# Altium footprint library KM_ALTIUM.PcbLib: 265 footprints (part 15 of 17)
Each footprint in its own frame and in the unit in brackets; x right, y up, seen from the top. Pads: shape width x height; smd on the part's side, far side on the other; paste and mask are expansions set on the pad; w line width, h text height; cw(c..) or ccw(c..) is an arc to the next point about the centre after c.
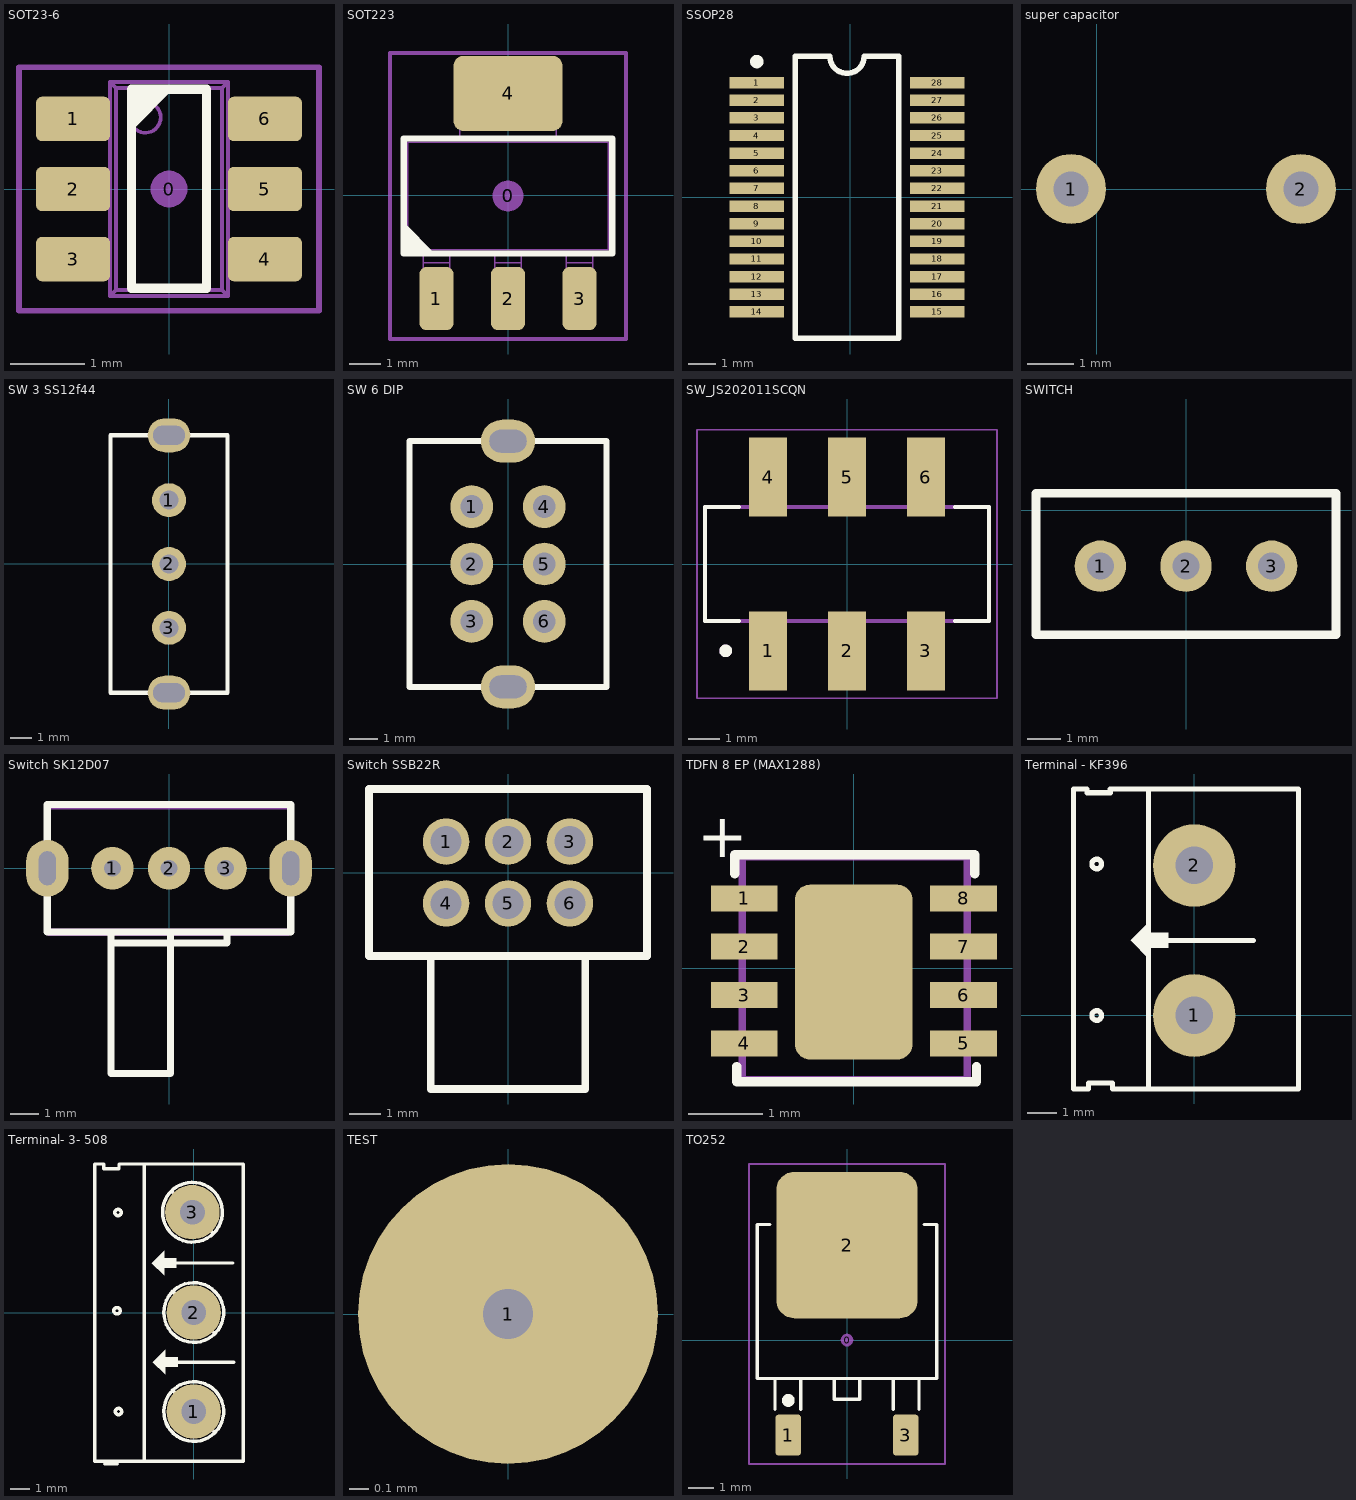
[diagram p14: the footprints below, top view; thin cyan lines are the x and y axes]

## SOT23-6 [mm]
pads (7):
  round 0.5 on Mech15: 0(0,0)
  rrect25% 1x0.6 smd: 1(-1.3,0.95) 2(-1.3,0) 3(-1.3,-0.95) 4(1.3,-0.95) 5(1.3,0) 6(1.3,0.95)
Top Overlay:
  region: -0.508,1.353 0.053,1.353 -0.508,0.792
  lines w0.127: -0.508,-1.347 0.508,-1.347 0.508,1.353 -0.508,1.353 -0.508,-1.347
  text "." at -2.275,0.95 h0.1
Mechanical 13:
  circle w0.05: c-0.32,0.97 r0.208
  lines w0.05: -1.191,-1.15 -1.191,-0.75 ; -1.191,-0.2 -1.191,0.2 ; -1.191,0.75 -1.191,1.15 ; -1.1,-1.15 -1.1,-0.75 ; -1.1,-0.2 -1.1,0.2 ; -1.1,0.75 -1.1,1.15 ; -1.094,-1.15 -1.094,-0.75 ; -1.094,-0.2 -1.094,0.2 ; -1.094,0.75 -1.094,1.15 ; -0.844,-1.15 -0.844,-0.75 ; -0.844,-0.2 -0.844,0.2 ; -0.844,0.75 -0.844,1.15 ; -0.8,-1.15 -1.4,-1.15 -1.4,-0.75 -0.8,-0.75 ; -0.8,-0.2 -1.4,-0.2 -1.4,0.2 -0.8,0.2 ; -0.8,0.75 -1.4,0.75 -1.4,1.15 -0.8,1.15 ; 0.8,-1.15 1.4,-1.15 1.4,-0.75 0.8,-0.75 ; 0.8,-0.2 1.4,-0.2 1.4,0.2 0.8,0.2 ; 0.8,0.75 1.4,0.75 1.4,1.15 0.8,1.15 ; 0.844,-1.15 0.844,-0.75 ; 0.844,-0.2 0.844,0.2 ; 0.844,0.75 0.844,1.15 ; 1.094,-1.15 1.094,-0.75 ; 1.094,-0.2 1.094,0.2 ; 1.094,0.75 1.094,1.15 ; 1.1,-1.15 1.1,-0.75 ; 1.1,-0.2 1.1,0.2 ; 1.1,0.75 1.1,1.15 ; 1.191,-1.15 1.191,-0.75 ; 1.191,-0.2 1.191,0.2 ; 1.191,0.75 1.191,1.15 ; -0.8,-1.45 -0.8,1.45 ; -0.8,-1.45 -0.719,-1.369 ; -0.8,-1.45 0.8,-1.45 ; -0.8,1.45 -0.719,1.369 ; -0.8,1.45 0.8,1.45 ; -0.719,-1.369 0.719,-1.369 ; -0.719,-1.369 -0.719,1.369 ; -0.719,1.369 0.719,1.369 ; 0.719,-1.369 0.8,-1.45 ; 0.719,-1.369 0.719,1.369 ; 0.719,1.369 0.8,1.45 ; 0.8,-1.45 0.8,1.45
Mechanical 15:
  lines w0.076: -2.032,-1.651 2.032,-1.651 2.032,1.651 -2.032,1.651 -2.032,-1.651
3D body "SOT23-6.STEP": height 1.44, standoff -0.01, extent -1.4,-1.45 1.4,1.45

## SOT223 [mm]
pads (5):
  round 1 on Mech15: 0(0,-0.025)
  rrect40% 1.1x2.032 smd: 1(-2.3,-3.325) 2(0,-3.325) 3(2.3,-3.325)
  rrect25% 3.5x2.413 smd: 4(0,3.275)
Top Overlay:
  region: -3.35,-1.875 -3.35,-0.875 -2.35,-1.875
  lines w0.2: -3.35,-1.875 -3.35,1.825 3.35,1.825 3.35,-1.875 -3.35,-1.875
Mechanical 13:
  lines w0.05: -2.72,-3.212 -1.88,-3.212 ; -2.72,-3.088 -1.88,-3.088 ; -2.72,-2.531 -1.88,-2.531 ; -2.72,-2.178 -1.88,-2.178 ; -2.72,-1.875 -3.35,-1.875 ; -1.88,-1.875 -0.42,-1.875 ; -1.55,1.825 -3.35,1.825 ; -1.55,2.127 1.55,2.127 ; -1.55,2.48 1.55,2.48 ; -1.55,3.037 1.55,3.037 ; -1.55,3.161 1.55,3.161 ; -0.42,-3.212 0.42,-3.212 ; -0.42,-3.088 0.42,-3.088 ; -0.42,-2.531 0.42,-2.531 ; -0.42,-2.178 0.42,-2.178 ; 0.42,-1.875 1.88,-1.875 ; 1.55,1.825 3.35,1.825 ; 1.88,-3.212 2.72,-3.212 ; 1.88,-3.088 2.72,-3.088 ; 1.88,-2.531 2.72,-2.531 ; 1.88,-2.178 2.72,-2.178 ; 2.72,-1.875 3.35,-1.875 ; -3.35,-1.875 -3.35,1.825 ; -3.35,-1.875 -3.231,-1.756 ; -3.35,1.825 -3.231,1.705 ; -3.231,-1.756 3.231,-1.756 ; -3.231,-1.756 -3.231,1.705 ; -3.231,1.705 3.231,1.705 ; 3.231,-1.756 3.231,1.705 ; 3.231,-1.756 3.35,-1.875 ; 3.231,1.705 3.35,1.825 ; 3.35,-1.875 3.35,1.825 ; -2.72,-3.675 -2.72,-1.854 -1.88,-1.854 -1.88,-3.675 -2.72,-3.675 ; -1.55,1.804 1.55,1.804 1.55,3.625 -1.55,3.625 -1.55,1.804 ; -0.42,-3.675 -0.42,-1.854 0.42,-1.854 0.42,-3.675 -0.42,-3.675 ; 1.88,-3.675 1.88,-1.854 2.72,-1.854 2.72,-3.675 1.88,-3.675
Mechanical 15:
  lines w0.127: -3.8,-4.625 3.8,-4.625 3.8,4.575 -3.8,4.575 -3.8,-4.625
3D body "User Library-SOT223-3.STEP": height 1.7, standoff 0, extent -3.25,-3.525 3.25,3.475

## SS1A05 [mm]

## SSOP28 [mm]
pads (28):
  rect 2x0.42 smd: 1(-3.452,4.225) 2(-3.452,3.575) 3(-3.452,2.925) 4(-3.452,2.275) 5(-3.452,1.625) 6(-3.452,0.975) 7(-3.452,0.325) 8(-3.452,-0.325) 9(-3.452,-0.975) 10(-3.452,-1.625) 11(-3.452,-2.275) 12(-3.452,-2.925) 13(-3.452,-3.575) 14(-3.452,-4.225) 15(3.198,-4.225) 16(3.198,-3.575) 17(3.198,-2.925) 18(3.198,-2.275) 19(3.198,-1.625) 20(3.198,-0.975) 21(3.198,-0.325) 22(3.198,0.325) 23(3.198,0.975) 24(3.198,1.625) 25(3.198,2.275) 26(3.198,2.925) 27(3.198,3.575) 28(3.198,4.225)
Top Overlay:
  circle w0.25: c-3.452,5 r0.125
  lines w0.2: -2.027,-5.2 -2.027,5.2 -0.76,5.2 ccw(c-0.127,5.2) 0.506,5.2 1.773,5.2 1.773,-5.2 -2.027,-5.2
3D body "User Library-SSOP-28-2.STEP": height 2.05, standoff 0.05, extent -4.033,-5.1 3.779,5.1

## super capacitor [mil] "KVR-5R0V155-R"
pads (2):
  round 60 hole 30: 1(-21.85,0) 2(175.23,0)
3D body "KVR-5R0V155-R.stp": height 767.72, standoff -157.52, extent -21.85,-374.01 175.23,374.02

## SW 3 SS12f44 [mm]
pads (5):
  round 1.6 hole 0.9: 1(0,3) 2(0,0) 3(0,-3)
  oval 2x1.6 hole 0.9 slot 1.5 at 0 deg: ""(0,-6.05) ""(0,6.05)
Top Overlay:
  lines w0.203: -2.75,-6.05 2.75,-6.05 2.75,6.05 -2.75,6.05 -2.75,-6.043

## SW 6 DIP [mm]
pads (8):
  round 1.5 hole 0.8: 1(-1.27,2.007) 2(-1.27,0) 3(-1.27,-2.007) 4(1.27,2.007) 5(1.27,0) 6(1.27,-2.007)
  oval 1.9x1.5 hole 0.8 slot 1.3 at 0 deg: ""(0,-4.3) ""(0,4.3)
Top Overlay:
  lines w0.203: -3.45,-4.3 3.45,-4.3 3.45,4.3 -3.45,4.3 -3.45,-4.279

## SW_JS202011SCQN [mm]
pads (6):
  rect 1.2x2.5 smd: 1(-2.5,-2.75) 2(0,-2.75) 3(2.5,-2.75) 4(-2.5,2.75) 5(0,2.75) 6(2.5,2.75)
Top Overlay:
  circle w0.2: c-3.84,-2.75 r0.1
  lines w0.127: -3.42,-1.8 -4.5,-1.8 -4.5,1.8 -3.42,1.8 ; 3.42,-1.8 4.5,-1.8 4.5,1.8 3.42,1.8
Mechanical 13:
  circle w0.2: c-3.84,-2.75 r0.1
  lines w0.127: -4.5,-1.8 4.5,-1.8 4.5,1.8 -4.5,1.8 -4.5,-1.8
Mechanical 15:
  lines w0.05: -4.75,-4.25 -4.75,4.25 4.75,4.25 4.75,-4.25 -4.75,-4.25
3D body "JS202011SCQN--3DModel-STEP-269445.STEP": height 5.51, standoff 0, extent -4.496,-3.746 4.496,3.747

## SWITCH [mm]
pads (3):
  round 1.524 hole 0.8: 1(-2.54,-1.65) 2(0,-1.65) 3(2.54,-1.65)
Top Overlay:
  lines w0.254: -4.445,-3.683 4.445,-3.683 4.445,0.508 -4.445,0.508 -4.445,-3.683
3D body "Selector Switch - SS12D00.stp": height 7.05, standoff -2.45, extent -4.293,-3.456 4.292,0.253

## Switch SK12D07 [mm]
pads (5):
  round 1.5 hole 0.6: 1(-2,0) 2(0,0) 3(2,0)
  oval 1.5x2 hole 0.6 slot 1.2 at 90 deg: ""(-4.3,0) ""(4.3,0)
Top Overlay:
  lines w0.254: -2.05,-7.25 -2.05,-2.25 ; -2.05,-2.257 -2.05,-2.642 2.05,-2.642 2.05,-2.268 ; -2.014,-7.25 0.05,-7.25 0.05,-2.25 ; -4.3,-2.25 4.3,-2.25 4.3,2.25 -4.3,2.25 -4.3,-2.25
Mechanical 1:
  lines w0.254: -4.293,-2.21 -4.242,-2.261 4.216,-2.261 4.293,-2.184 4.293,2.134 4.216,2.21 -4.293,2.21 -4.293,-2.21
3D body "3Pins SPDT switch SK-12D07 1P2T.step": height 4.7, standoff -2.8, extent -4.3,-4.69 4.3,2.25

## Switch SSB22R [mm]
pads (6):
  round 1.5 hole 1: 1(-2,1) 2(0,1) 3(2,1) 4(-2,-1) 5(0,-1) 6(2,-1)
Top Overlay:
  lines w0.254: -4.5,-2.7 4.5,-2.7 4.5,2.7 -4.5,2.7 -4.5,-2.7 ; -2.5,-7 -2.5,-2.7 2.5,-2.7 2.5,-7 -2.5,-7

## TDFN 8 EP (MAX1288) [mm]
pads (9):
  rect 0.9x0.35 smd: 1(-1.473,0.94) 2(-1.473,0.29) 3(-1.473,-0.36) 4(-1.473,-1.01) 5(1.477,-1.01) 6(1.477,-0.36) 7(1.477,0.29) 8(1.477,0.94)
  rrect25% 1.58x2.35 smd: ""(0,-0.051)
Top Overlay:
  lines w0.127: -1.6,1.27 -1.6,1.524 1.626,1.524 1.626,1.27 ; -1.575,-1.321 -1.575,-1.524 1.651,-1.524 1.651,-1.321
  text "+" at -2.108,1.295 h1.02
Mechanical 3:
  lines w0.1: -1.499,-1.499 -1.499,1.524 1.524,1.524 1.524,-1.524 1.499,-1.499 -1.499,-1.499
Mechanical 13:
  lines w0.1: -1.499,-1.499 -1.499,1.499 1.524,1.499 1.524,-1.499 -1.499,-1.499
3D body "User Library-TDFN 8.step": height 0.7, standoff -0.05, extent -1.476,-1.525 1.526,1.475

## Terminal - KF396 [mil]
pads (2):
  round 110 hole 50: 1(0,0) 2(0,200)
Top Overlay:
  circle w7: c-130,202 r6.4
  circle w7: c-130,0 r6.4
  region: -85,100 -60,75 -60,90 -35,90 -35,110 -60,110 -60,125
  lines w7: -72,100 79,100 ; -61,-96 -61,301 ; -161,-98 -161,302 -143,302 -143,297 -112,297 -112,302 139,302 139,-98 -11,-98 -109,-98 -109,-90 -141,-90 -141,-98 -161,-98
3D body "SW3dPS-KRM2.STEP": height 393.7, standoff -157.48, extent -155.28,-91.85 140,301.85

## Terminal- 3- 508 [mil]
pads (3):
  round 110 hole 50: 1(0,-200) 2(0,0) 3(-2.62,202.62)
Top Overlay:
  circle w7: c-153,202 r6.4
  circle w7: c-152,-200 r6.4
  circle w7: c-155,3.6 r6.4
  region: -85,100 -60,75 -60,90 -35,90 -35,110 -60,110 -60,125
  region: -82.5,-100 -57.5,-125 -57.5,-110 -32.5,-110 -32.5,-90 -57.5,-90 -57.5,-75
  lines w7: -180,-306 -155,-306 ; -100,-300 -100,300 ; -72,100 79,100 ; -70,-100 81,-100 ; -48.68,241.65 ccw(c-2.62,202.62) -42.19,248.22 ; -46.18,38.89 ccw(c0,0) -39.82,45.38 ; -45.71,-160.56 ccw(c0,-200) -40.28,-155.03 ; -45,245 39,160 ; -43,-157 42,-242 ; -43,43 41.5,-41.5 ; -200,-300 -50,-300 100,-300 100,300 -151,300 -151,290 -182,290 -182,300 -200,300 -200,-300
3D body "User Library-3 Way PCB Screw Terminal Block 5_08mm.STEP": height 598.93, standoff -137.29, extent -183,-298 171.33,302

## TEST [mil]
pads (1):
  round 60 hole 10: 1(0,0)

## TO252 [mm]
pads (4):
  round 0.5 on Mech15: 0(0,0)
  rrect25% 1x1.6 smd: 1(-2.285,-3.7) 3(2.285,-3.7)
  rrect25% 5.5x5.7 smd: 2(0,3.7)
Top Overlay:
  circle w0.25: c-2.285,-2.35 r0.125
  lines w0.127: -3,4.5 -3.5,4.5 -3.5,-1.5 3.5,-1.5 3.5,4.5 3,4.5 ; -2.8,-2.7 -2.8,-1.5 -1.8,-1.5 -1.8,-2.7 ; 1.8,-2.7 1.8,-1.5 2.8,-1.5 2.8,-2.7 ; -0.5,-2.3 0.5,-2.3 0.5,-1.5 -0.5,-1.5 -0.5,-2.3
Mechanical 15:
  lines w0.076: -3.81,-4.826 3.81,-4.826 3.81,6.858 -3.81,6.858 -3.81,-4.826
3D body "DPAK.stp": height 2.31, standoff 0, extent -3.3,-3.951 3.3,5.762